# Altium integrated library Ceramic Capacitor 2.2uF 0805.IntLib: 1 symbol
Pins are listed as number, name and electrical type; pins without a type are passive.

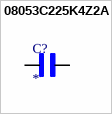
[diagram p0: symbol 08053C225K4Z2A]

## 08053C225K4Z2A
designator C?
2.2 ÂµF Â±10% 25V Ceramic Capacitor X7R 0805 (2012 Metric); MF: AVX; MP: 08053C225K4Z2A; SnapEDA_Link: https://www.snapeda.com/parts/08053C225K4Z2A/AVX/view-part/?ref=snap; Package: 2012 AVX; Value: *; Check_prices: https://www.snapeda.com/parts/08053C225K4Z2A/AVX/view-part/?ref=eda
footprint CAPC2012X152N
pins: 1, 2